# Altium footprint library BlackfinSOM.PcbLib: 28 footprints (part 1 of 2)
Each footprint in its own frame and in the unit in brackets; x right, y up, seen from the top. Pads: shape width x height; smd on the part's side, far side on the other; paste and mask are expansions set on the pad; w line width, h text height; cw(c..) or ccw(c..) is an arc to the next point about the centre after c.
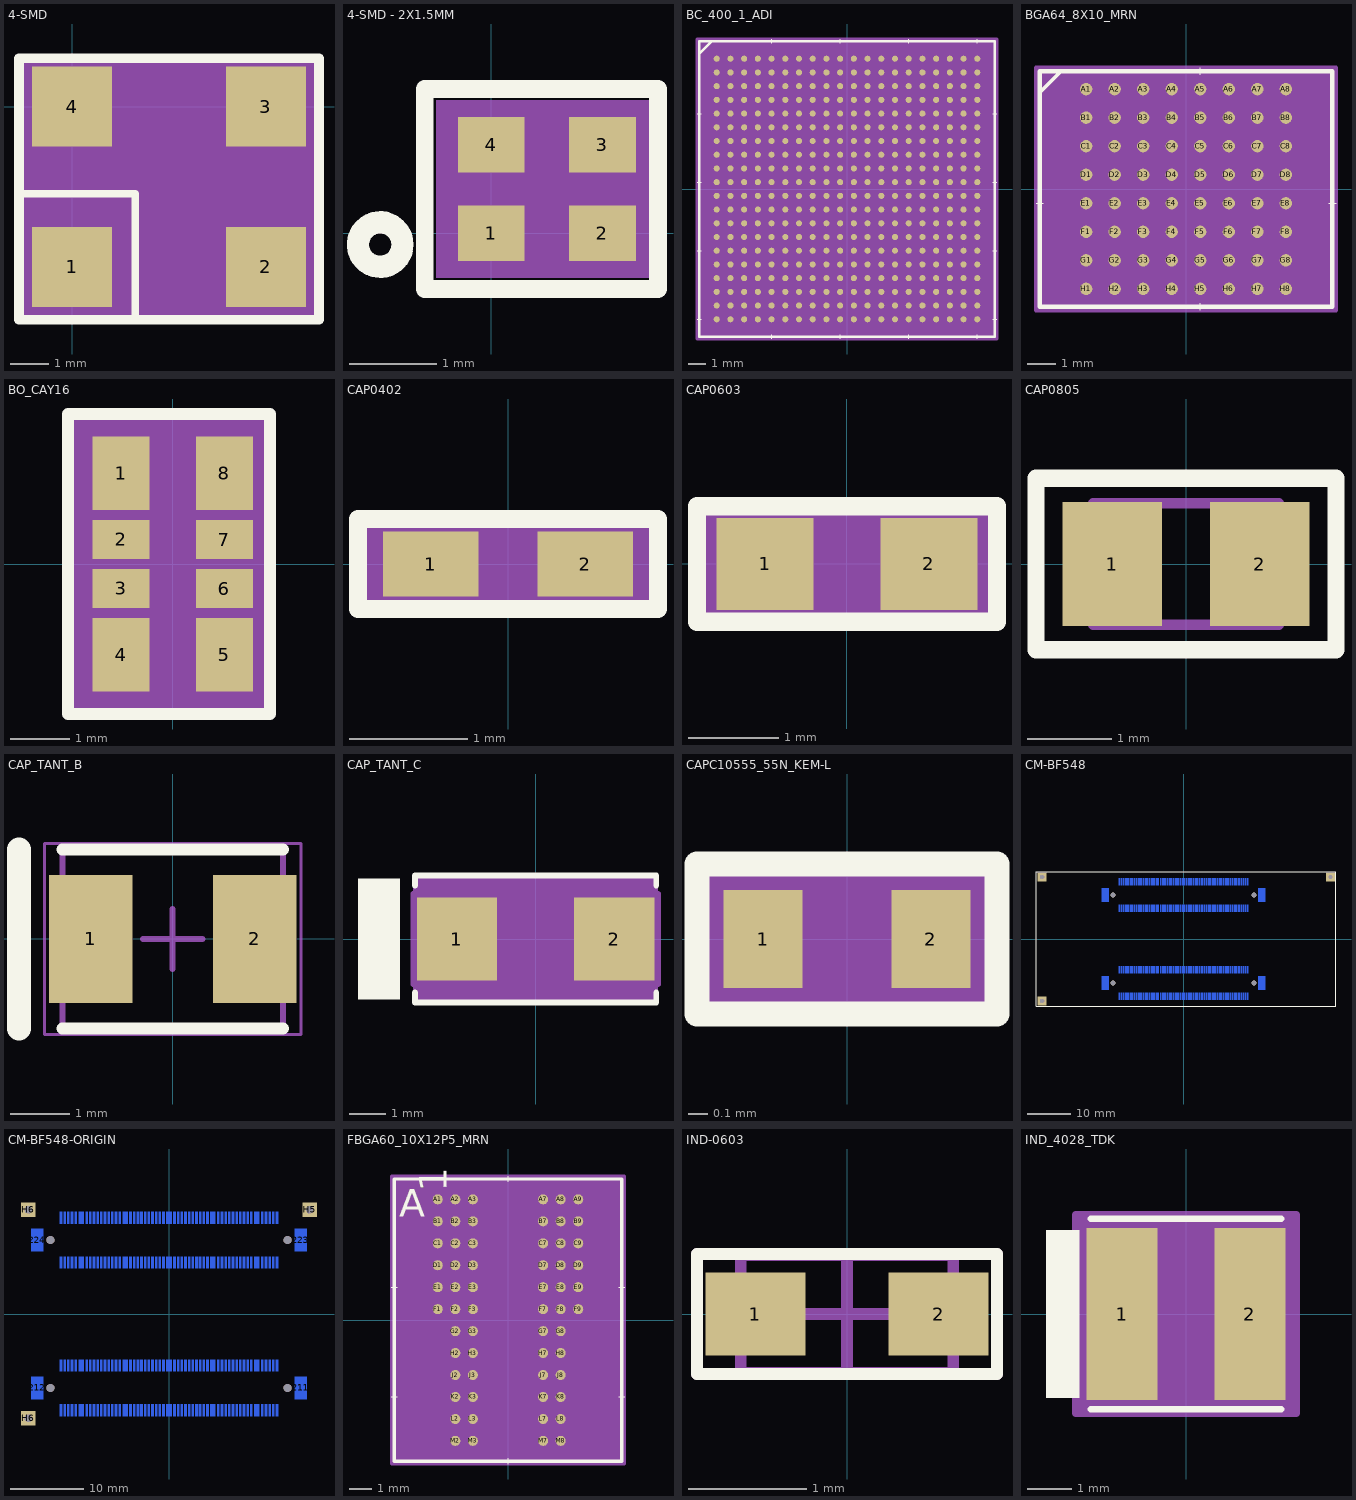
[diagram p0: the footprints below, top view; thin cyan lines are the x and y axes]

## 4-SMD [mm]
pads (4):
  rect 2.1x2.1 smd: 1(0,-4.2) 2(5.08,-4.2) 3(5.08,0) 4(0,0)
Top Overlay:
  lines w0.203: -1.397,-2.286 1.651,-2.286 1.651,-5.588
  lines w0.254: -1.397,-5.588 6.477,-5.588 6.477,1.27 -1.397,1.27 -1.397,-5.588
Mechanical 15:
  rectangle: -1.397,-5.588 6.477,1.27
3D body "User Library-CFPS72-73.STEP": height 1.51, standoff -0.01, extent -1.016,-4.445 5.984,0.555

## 4-SMD - 2X1.5MM [mil]
pads (4):
  rect 30x25 smd: 1(0,0) 2(50,0) 3(50,40) 4(0,40)
Top Overlay:
  circle w10: c-50,-5 r10
  lines w8: -30,-25 -30,65 75,65 75,-25 -30,-25
Mechanical 15:
  rectangle: -25,-20 75,60
3D body "crystal_rsx1612.stp": height 13.78, standoff -0.14, extent -6.49,-3.62 56.5,43.63

## BC_400_1_ADI [mm]
pads (400):
  round 0.356 smd paste+0 mask+0: A1(-7.6,7.6) A2(-6.8,7.6) A3(-6,7.6) A4(-5.2,7.6) A5(-4.4,7.6) A6(-3.6,7.6) A7(-2.8,7.6) A8(-2,7.6) A9(-1.2,7.6) A10(-0.4,7.6) A11(0.4,7.6) A12(1.2,7.6) A13(2,7.6) A14(2.8,7.6) A15(3.6,7.6) A16(4.4,7.6) A17(5.2,7.6) A18(6,7.6) A19(6.8,7.6) A20(7.6,7.6) B1(-7.6,6.8) B2(-6.8,6.8) B3(-6,6.8) B4(-5.2,6.8) B5(-4.4,6.8) B6(-3.6,6.8) B7(-2.8,6.8) B8(-2,6.8) B9(-1.2,6.8) B10(-0.4,6.8) B11(0.4,6.8) B12(1.2,6.8) B13(2,6.8) B14(2.8,6.8) B15(3.6,6.8) B16(4.4,6.8) B17(5.2,6.8) B18(6,6.8) B19(6.8,6.8) B20(7.6,6.8) C1(-7.6,6) C2(-6.8,6) C3(-6,6) C4(-5.2,6) C5(-4.4,6) C6(-3.6,6) C7(-2.8,6) C8(-2,6) C9(-1.2,6) C10(-0.4,6) C11(0.4,6) C12(1.2,6) C13(2,6) C14(2.8,6) C15(3.6,6) C16(4.4,6) C17(5.2,6) C18(6,6) C19(6.8,6) C20(7.6,6) D1(-7.6,5.2) D2(-6.8,5.2) D3(-6,5.2) D4(-5.2,5.2) D5(-4.4,5.2) D6(-3.6,5.2) D7(-2.8,5.2) D8(-2,5.2) D9(-1.2,5.2) D10(-0.4,5.2) D11(0.4,5.2) D12(1.2,5.2) D13(2,5.2) D14(2.8,5.2) D15(3.6,5.2) D16(4.4,5.2) D17(5.2,5.2) D18(6,5.2) D19(6.8,5.2) D20(7.6,5.2) E1(-7.6,4.4) E2(-6.8,4.4) E3(-6,4.4) E4(-5.2,4.4) E5(-4.4,4.4) E6(-3.6,4.4) E7(-2.8,4.4) E8(-2,4.4) E9(-1.2,4.4) E10(-0.4,4.4) E11(0.4,4.4) E12(1.2,4.4) E13(2,4.4) E14(2.8,4.4) E15(3.6,4.4) E16(4.4,4.4) E17(5.2,4.4) E18(6,4.4) E19(6.8,4.4) E20(7.6,4.4) F1(-7.6,3.6) F2(-6.8,3.6) F3(-6,3.6) F4(-5.2,3.6) F5(-4.4,3.6) F6(-3.6,3.6) F7(-2.8,3.6) F8(-2,3.6) F9(-1.2,3.6) F10(-0.4,3.6) F11(0.4,3.6) F12(1.2,3.6) F13(2,3.6) F14(2.8,3.6) F15(3.6,3.6) F16(4.4,3.6) F17(5.2,3.6) F18(6,3.6) F19(6.8,3.6) F20(7.6,3.6) G1(-7.6,2.8) G2(-6.8,2.8) G3(-6,2.8) G4(-5.2,2.8) G5(-4.4,2.8) G6(-3.6,2.8) G7(-2.8,2.8) G8(-2,2.8) G9(-1.2,2.8) G10(-0.4,2.8) G11(0.4,2.8) G12(1.2,2.8) G13(2,2.8) G14(2.8,2.8) G15(3.6,2.8) G16(4.4,2.8) G17(5.2,2.8) G18(6,2.8) G19(6.8,2.8) G20(7.6,2.8) H1(-7.6,2) H2(-6.8,2) H3(-6,2) H4(-5.2,2) H5(-4.4,2) H6(-3.6,2) H7(-2.8,2) H8(-2,2) H9(-1.2,2) H10(-0.4,2) H11(0.4,2) H12(1.2,2) H13(2,2) H14(2.8,2) H15(3.6,2) H16(4.4,2) H17(5.2,2) H18(6,2) H19(6.8,2) H20(7.6,2) J1(-7.6,1.2) J2(-6.8,1.2) J3(-6,1.2) J4(-5.2,1.2) J5(-4.4,1.2) J6(-3.6,1.2) J7(-2.8,1.2) J8(-2,1.2) J9(-1.2,1.2) J10(-0.4,1.2) J11(0.4,1.2) J12(1.2,1.2) J13(2,1.2) J14(2.8,1.2) J15(3.6,1.2) J16(4.4,1.2) J17(5.2,1.2) J18(6,1.2) J19(6.8,1.2) J20(7.6,1.2) K1(-7.6,0.4) K2(-6.8,0.4) K3(-6,0.4) K4(-5.2,0.4) K5(-4.4,0.4) K6(-3.6,0.4) K7(-2.8,0.4) K8(-2,0.4) K9(-1.2,0.4) K10(-0.4,0.4) K11(0.4,0.4) K12(1.2,0.4) K13(2,0.4) K14(2.8,0.4) K15(3.6,0.4) K16(4.4,0.4) K17(5.2,0.4) K18(6,0.4) K19(6.8,0.4) K20(7.6,0.4) L1(-7.6,-0.4) L2(-6.8,-0.4) L3(-6,-0.4) L4(-5.2,-0.4) L5(-4.4,-0.4) L6(-3.6,-0.4) L7(-2.8,-0.4) L8(-2,-0.4) L9(-1.2,-0.4) L10(-0.4,-0.4) L11(0.4,-0.4) L12(1.2,-0.4) L13(2,-0.4) L14(2.8,-0.4) L15(3.6,-0.4) L16(4.4,-0.4) L17(5.2,-0.4) L18(6,-0.4) L19(6.8,-0.4) L20(7.6,-0.4) M1(-7.6,-1.2) M2(-6.8,-1.2) M3(-6,-1.2) M4(-5.2,-1.2) M5(-4.4,-1.2) M6(-3.6,-1.2) M7(-2.8,-1.2) M8(-2,-1.2) M9(-1.2,-1.2) M10(-0.4,-1.2) M11(0.4,-1.2) M12(1.2,-1.2) M13(2,-1.2) M14(2.8,-1.2) M15(3.6,-1.2) M16(4.4,-1.2) M17(5.2,-1.2) M18(6,-1.2) M19(6.8,-1.2) M20(7.6,-1.2) N1(-7.6,-2) N2(-6.8,-2) N3(-6,-2) N4(-5.2,-2) N5(-4.4,-2) N6(-3.6,-2) N7(-2.8,-2) N8(-2,-2) N9(-1.2,-2) N10(-0.4,-2) N11(0.4,-2) N12(1.2,-2) N13(2,-2) N14(2.8,-2) N15(3.6,-2) N16(4.4,-2) N17(5.2,-2) N18(6,-2) N19(6.8,-2) N20(7.6,-2) P1(-7.6,-2.8) P2(-6.8,-2.8) P3(-6,-2.8) P4(-5.2,-2.8) P5(-4.4,-2.8) P6(-3.6,-2.8) P7(-2.8,-2.8) P8(-2,-2.8) P9(-1.2,-2.8) P10(-0.4,-2.8) P11(0.4,-2.8) P12(1.2,-2.8) P13(2,-2.8) P14(2.8,-2.8) P15(3.6,-2.8) P16(4.4,-2.8) P17(5.2,-2.8) P18(6,-2.8) P19(6.8,-2.8) P20(7.6,-2.8) R1(-7.6,-3.6) R2(-6.8,-3.6) R3(-6,-3.6) R4(-5.2,-3.6) R5(-4.4,-3.6) R6(-3.6,-3.6) R7(-2.8,-3.6) R8(-2,-3.6) R9(-1.2,-3.6) R10(-0.4,-3.6) R11(0.4,-3.6) R12(1.2,-3.6) R13(2,-3.6) R14(2.8,-3.6) R15(3.6,-3.6) R16(4.4,-3.6) R17(5.2,-3.6) R18(6,-3.6) R19(6.8,-3.6) R20(7.6,-3.6) T1(-7.6,-4.4) T2(-6.8,-4.4) T3(-6,-4.4) T4(-5.2,-4.4) T5(-4.4,-4.4) T6(-3.6,-4.4) T7(-2.8,-4.4) T8(-2,-4.4) T9(-1.2,-4.4) T10(-0.4,-4.4) T11(0.4,-4.4) T12(1.2,-4.4) T13(2,-4.4) T14(2.8,-4.4) T15(3.6,-4.4) T16(4.4,-4.4) T17(5.2,-4.4) T18(6,-4.4) T19(6.8,-4.4) T20(7.6,-4.4) U1(-7.6,-5.2) U2(-6.8,-5.2) U3(-6,-5.2) U4(-5.2,-5.2) U5(-4.4,-5.2) U6(-3.6,-5.2) U7(-2.8,-5.2) U8(-2,-5.2) U9(-1.2,-5.2) U10(-0.4,-5.2) U11(0.4,-5.2) U12(1.2,-5.2) U13(2,-5.2) U14(2.8,-5.2) U15(3.6,-5.2) U16(4.4,-5.2) U17(5.2,-5.2) U18(6,-5.2) U19(6.8,-5.2) U20(7.6,-5.2) V1(-7.6,-6) V2(-6.8,-6) V3(-6,-6) V4(-5.2,-6) V5(-4.4,-6) V6(-3.6,-6) V7(-2.8,-6) V8(-2,-6) V9(-1.2,-6) V10(-0.4,-6) V11(0.4,-6) V12(1.2,-6) V13(2,-6) V14(2.8,-6) V15(3.6,-6) V16(4.4,-6) V17(5.2,-6) V18(6,-6) V19(6.8,-6) V20(7.6,-6) W1(-7.6,-6.8) W2(-6.8,-6.8) W3(-6,-6.8) W4(-5.2,-6.8) W5(-4.4,-6.8) W6(-3.6,-6.8) W7(-2.8,-6.8) W8(-2,-6.8) W9(-1.2,-6.8) W10(-0.4,-6.8) W11(0.4,-6.8) W12(1.2,-6.8) W13(2,-6.8) W14(2.8,-6.8) W15(3.6,-6.8) W16(4.4,-6.8) W17(5.2,-6.8) W18(6,-6.8) W19(6.8,-6.8) W20(7.6,-6.8) Y1(-7.6,-7.6) Y2(-6.8,-7.6) Y3(-6,-7.6) Y4(-5.2,-7.6) Y5(-4.4,-7.6) Y6(-3.6,-7.6) Y7(-2.8,-7.6) Y8(-2,-7.6) Y9(-1.2,-7.6) Y10(-0.4,-7.6) Y11(0.4,-7.6) Y12(1.2,-7.6) Y13(2,-7.6) Y14(2.8,-7.6) Y15(3.6,-7.6) Y16(4.4,-7.6) Y17(5.2,-7.6) Y18(6,-7.6) Y19(6.8,-7.6) Y20(7.6,-7.6)
Top Overlay:
  lines w0.025: -8.75,-7.6 -8.496,-7.6 ; -8.75,-3.6 -8.496,-3.6 ; -8.75,0.4 -8.496,0.4 ; -8.75,4.4 -8.496,4.4 ; -4.4,-8.75 -4.4,-8.496 ; -4.4,8.496 -4.4,8.75 ; -0.4,-8.75 -0.4,-8.496 ; -0.4,8.496 -0.4,8.75 ; 3.6,-8.75 3.6,-8.496 ; 3.6,8.496 3.6,8.75 ; 7.6,-8.75 7.6,-8.496 ; 7.6,8.496 7.6,8.75 ; 8.496,-7.6 8.75,-7.6 ; 8.496,-3.6 8.75,-3.6 ; 8.496,0.4 8.75,0.4 ; 8.496,4.4 8.75,4.4
  lines w0.127: -8.636,7.874 -7.874,8.636
  lines w0.152: -8.623,-8.623 -8.623,8.623 8.623,8.623 8.623,-8.623 -8.623,-8.623
Mechanical 13:
  lines w0.025: -8.496,8.096 -8.096,8.496 ; -8.496,-8.496 -8.496,8.496 8.496,8.496 8.496,-8.496 -8.496,-8.496
Mechanical 15:
  region: 8.75,-8.75 -8.75,-8.75 -8.75,8.75 8.75,8.75
  lines w0.152: -8.75,-8.75 8.75,-8.75 8.75,8.75 -8.75,8.75 -8.75,-8.75
3D body: height 0.25, standoff 0, extent 0,0 0.254,0.254
3D body "BC_400_1_ADI.step": height 1.7, standoff 0, extent -8.496,-8.496 8.496,8.496

## BGA64_8X10_MRN [mm]
pads (64):
  round 0.432 smd paste+0 mask+0: A1(-3.5,3.5) A2(-2.5,3.5) A3(-1.5,3.5) A4(-0.5,3.5) A5(0.5,3.5) A6(1.5,3.5) A7(2.5,3.5) A8(3.5,3.5) B1(-3.5,2.5) B2(-2.5,2.5) B3(-1.5,2.5) B4(-0.5,2.5) B5(0.5,2.5) B6(1.5,2.5) B7(2.5,2.5) B8(3.5,2.5) C1(-3.5,1.5) C2(-2.5,1.5) C3(-1.5,1.5) C4(-0.5,1.5) C5(0.5,1.5) C6(1.5,1.5) C7(2.5,1.5) C8(3.5,1.5) D1(-3.5,0.5) D2(-2.5,0.5) D3(-1.5,0.5) D4(-0.5,0.5) D5(0.5,0.5) D6(1.5,0.5) D7(2.5,0.5) D8(3.5,0.5) E1(-3.5,-0.5) E2(-2.5,-0.5) E3(-1.5,-0.5) E4(-0.5,-0.5) E5(0.5,-0.5) E6(1.5,-0.5) E7(2.5,-0.5) E8(3.5,-0.5) F1(-3.5,-1.5) F2(-2.5,-1.5) F3(-1.5,-1.5) F4(-0.5,-1.5) F5(0.5,-1.5) F6(1.5,-1.5) F7(2.5,-1.5) F8(3.5,-1.5) G1(-3.5,-2.5) G2(-2.5,-2.5) G3(-1.5,-2.5) G4(-0.5,-2.5) G5(0.5,-2.5) G6(1.5,-2.5) G7(2.5,-2.5) G8(3.5,-2.5) H1(-3.5,-3.5) H2(-2.5,-3.5) H3(-1.5,-3.5) H4(-0.5,-3.5) H5(0.5,-3.5) H6(1.5,-3.5) H7(2.5,-3.5) H8(3.5,-3.5)
Top Overlay:
  lines w0.025: -5.258,-0.5 -5.004,-0.5 ; 0.5,-4.255 0.5,-4 ; 0.5,4 0.5,4.255 ; 5.004,-0.5 5.258,-0.5
  lines w0.127: -5.08,3.429 -4.445,4.064
  lines w0.152: -5.131,-4.127 5.131,-4.127 5.131,4.127 -5.131,4.127 -5.131,-4.127
Mechanical 13:
  lines w0.025: -5.004,3.501 -4.504,4 ; -5.004,-4 5.004,-4 5.004,4 -5.004,4 -5.004,-4
Mechanical 15:
  region: 5.258,-4.255 -5.258,-4.255 -5.258,4.255 5.258,4.255
  lines w0.152: -5.258,-4.255 -5.258,4.255 5.258,4.255 5.258,-4.255 -5.258,-4.255
3D body: height 0.25, standoff 0, extent 0,0 0.254,0.254
3D body "BGA64_8X10_MRN.step": height 1.2, standoff 0, extent -5.004,-4 5.004,4

## BO_CAY16 [mil]
pads (8):
  rect 38x49 smd: 1(-34.5,60.5) 4(-34.5,-60.5) 5(34.5,-60.5) 8(34.5,60.5)
  rect 38x26 smd mask+0: 2(-34.5,16.35) 3(-34.5,-16.3) 6(34.5,-16.35) 7(34.5,16.3)
Top Overlay:
  lines w8: -70,-100 65,-100 65,100 -70,100 -70,-100
Mechanical 13:
  lines w0: -35.5,-35.95 ccw(c-35.5,-32.62) -35.5,-29.3 ; -35.5,-3.3 ccw(c-35.5,0.03) -35.5,3.35 ; -35.5,29.35 ccw(c-35.5,32.67) -35.5,36 ; 35.5,-35.95 cw(c35.5,-32.62) 35.5,-29.3 ; 35.5,-3.3 cw(c35.5,0.03) 35.5,3.35 ; 35.5,29.35 cw(c35.5,32.67) 35.5,36
  lines w1: -35.5,-36 -35.5,-67 35.5,-67 35.5,-36 ; -35.5,-29.3 -35.5,-3.3 ; -35.5,3.35 -35.5,29.35 ; -35.5,36 -35.5,67 35.5,67 35.5,36 ; -35.5,57 -25.5,67 ; 35.5,-29.3 35.5,-3.3 ; 35.5,3.35 35.5,29.35
  text "*" at -33,22 h50
Mechanical 15:
  region: 63.5,-95 -63.5,-95 -63.5,95 63.5,95
  region: 35.5,-67 -35.5,-67 -35.5,67 35.5,67
  lines w6: -63.5,-95 -63.5,95 63.5,95 63.5,-95 -63.5,-95
3D body: height 10, standoff 0, extent 0,0 10,10
3D body "BO_CAY16.step": height 24.02, standoff 0, extent -35.51,-67 35.51,67.01

## CAP0402 [mm]
pads (2):
  rect 0.809x0.551 smd paste+0 mask+0: 1(-0.654,0) 2(0.654,0)
Top Overlay:
  lines w0.152: -1.27,-0.381 1.27,-0.381 1.27,0.381 -1.27,0.381 -1.27,-0.381
Mechanical 13:
  circle w0: c-0.527,0 r0.076
  lines w0.025: -0.5,-0.25 -0.5,0.25 ; -0.5,-0.25 -0.25,-0.25 -0.25,0.25 -0.5,0.25 ; -0.5,-0.25 0.5,-0.25 ; -0.5,-0.25 -0.5,0.25 ; -0.5,0.25 0.5,0.25 ; 0.5,-0.25 0.25,-0.25 0.25,0.25 0.5,0.25 ; 0.5,-0.25 0.5,0.25 ; 0.5,-0.25 0.5,0.25
Mechanical 15:
  region: 1.143,-0.254 -1.143,-0.254 -1.143,0.254 1.143,0.254
  lines w0.152: -1.143,-0.254 -1.143,0.254 1.143,0.254 1.143,-0.254 -1.143,-0.254
3D body: height 0.25, standoff 0, extent 0,0 0.254,0.254
3D body "CAPC1005X56N EIA 0402.step": height 0.56, standoff 0, extent -0.5,-0.25 0.5,0.25

## CAP0603 [mil]
pads (2):
  rect 42x40 smd paste+0 mask+0: 1(-35.5,0) 2(35.5,0)
Top Overlay:
  lines w8: -65,-25 -65,25 65,25 65,-25 -65,-25
Mechanical 13:
  circle w0: c-24.5,0 r3
  lines w1: -34.5,-19 -34.5,19 ; -34.5,-19 -14.5,-19 -14.5,19 -34.5,19 ; -34.5,-19 34.5,-19 ; -34.5,-19 -34.5,19 ; -34.5,19 34.5,19 ; 34.5,-19 14.5,-19 14.5,19 34.5,19 ; 34.5,-19 34.5,19 ; 34.5,-19 34.5,19
Mechanical 15:
  region: 60,-20 -60,-20 -60,20 60,20
  lines w6: -60,-20 -60,20 60,20 60,-20 -60,-20
3D body: height 10, standoff 0, extent 0,0 10,10
3D body "CAP_0603G_AVX-M.step": height 35, standoff 0, extent -34.49,-19.01 34.49,19.02

## CAP0805 [mm]
pads (2):
  rect 1.18x1.47 smd: 1(-0.874,0) 2(0.874,0)
Top Overlay:
  lines w0.203: -1.778,-1.016 1.778,-1.016 1.778,1.016 -1.778,1.016 -1.778,-1.016
Mechanical 13:
  lines w0.127: -1.1,-0.72 -1.1,0.72 1.1,0.72 1.1,-0.72 -1.1,-0.72
Mechanical 15:
  lines w0.05: -1.713,-0.983 -1.713,0.983 1.713,0.983 1.713,-0.983 -1.713,-0.983
3D body "c0805c221k5ractu.stp": height 0.86, standoff -0.02, extent -1.1,-0.688 1.1,0.762

## CAP_TANT_B [mm] "Molded Capacitor, 2-Leads, Body 3.70x3.00mm, IPC High Density"
height 2.1
pads (2):
  rect 1.4x2.15 smd: 1(-1.375,0) 2(1.375,0)
Top Overlay:
  lines w0.2: -1.85,-1.5 1.85,-1.5 ; -1.85,1.5 1.85,1.5
  lines w0.4: -2.575,-1.5 -2.575,1.5
Mechanical 13:
  lines w0.1: -1.85,-1.5 1.85,-1.5 1.85,1.5 -1.85,1.5 -1.85,-1.5
Mechanical 15:
  lines w0.05: -2.15,-1.6 2.15,-1.6 2.15,1.6 -2.15,1.6 -2.15,-1.6
  lines w0.1: -0.5,0 0.5,0 ; 0,-0.5 0,0.5
3D body "CAPMP3528X21L.step": height 2.1, standoff 0, extent -2.07,-1.5 2.07,1.5

## CAP_TANT_C [mm]
pads (2):
  rect 2.179x2.249 smd paste+0 mask+0: 1(-2.136,0) 2(2.136,0)
Top Overlay:
  rectangle: -4.826,-1.651 -3.683,1.651
  lines w0.152: -3.277,-1.453 -3.277,-1.727 3.277,-1.727 3.277,-1.453 ; -3.277,1.453 -3.277,1.727 3.277,1.727 3.277,1.453
Mechanical 13:
  lines w0.025: -3.15,-1.6 3.15,-1.6 3.15,1.6 -3.15,1.6 -3.15,-1.6
Mechanical 15:
  region: -3.252,-1.226 -3.328,-1.226 -3.328,1.226 -3.252,1.226 -3.252,1.702 3.252,1.702 3.252,1.226 3.328,1.226 3.328,-1.226 3.252,-1.226 3.252,-1.702 -3.252,-1.702
  lines w0.152: -3.328,-1.226 -3.328,1.226 -3.252,1.226 -3.252,1.702 3.252,1.702 3.252,1.226 3.328,1.226 3.328,-1.226 3.252,-1.226 3.252,-1.702 -3.252,-1.702 -3.252,-1.226 -3.328,-1.226
3D body: height 0.25, standoff 0, extent 0,0 0.254,0.254
3D body "User Library-AVX_C_CASE.STEP": height 2.7, standoff 0, extent -3.05,-1.623 3.05,1.727

## CAPC10555_55N_KEM-L [mm]
pads (2):
  rect 0.402x0.499 smd paste+0 mask+0: 1(-0.426,0) 2(0.426,0)
Top Overlay:
  lines w0.127: -0.762,-0.381 0.762,-0.381 0.762,0.381 -0.762,0.381 -0.762,-0.381
Mechanical 5:
  region: 0.762,-0.381 -0.762,-0.381 -0.762,0.381 0.762,0.381
Mechanical 13:
  lines w0.025: -0.525,-0.275 -0.525,0.275 ; -0.525,-0.275 -0.275,-0.275 -0.275,0.275 -0.525,0.275 ; -0.525,-0.275 0.525,-0.275 ; -0.525,-0.275 -0.525,0.275 ; -0.525,0.275 0.525,0.275 ; 0.525,-0.275 0.275,-0.275 0.275,0.275 0.525,0.275 ; 0.525,-0.275 0.525,0.275 ; 0.525,-0.275 0.525,0.275
Mechanical 15:
  region: 0.728,-0.351 -0.728,-0.351 -0.728,0.351 0.728,0.351
  lines w0.152: -0.728,-0.351 -0.728,0.351 0.728,0.351 0.728,-0.351 -0.728,-0.351
3D body "User Library-0402(1005M) Cap.STEP": height 0.51, standoff 0, extent -0.508,-0.254 0.508,0.254
3D body: height 0.25, standoff 0, extent 0,0 0.254,0.254

## CM-BF548 [mm]
height 7
pads (231):
  rect 0.3x1.6 smd far side paste-0.03: 1(14.75,-13.15) 2(14.25,-13.15) 3(13.75,-13.15) 4(13.25,-13.15) 5(12.75,-13.15) 6(11.25,-13.15) 7(10.75,-13.15) 8(10.25,-13.15) 9(9.75,-13.15) 10(9.25,-13.15) 11(8.75,-13.15) 12(8.25,-13.15) 13(7.75,-13.15) 14(7.25,-13.15) 15(6.75,-13.15) 16(5.25,-13.15) 17(4.75,-13.15) 18(4.25,-13.15) 19(3.75,-13.15) 20(3.25,-13.15) 21(2.75,-13.15) 22(2.25,-13.15) 23(1.75,-13.15) 24(1.25,-13.15) 25(0.75,-13.15) 26(-0.75,-13.15) 27(-1.25,-13.15) 28(-1.75,-13.15) 29(-2.25,-13.15) 30(-2.75,-13.15) 31(-3.25,-13.15) 32(-3.75,-13.15) 33(-4.25,-13.15) 34(-4.75,-13.15) 35(-5.25,-13.15) 36(-6.75,-13.15) 37(-7.25,-13.15) 38(-7.75,-13.15) 39(-8.25,-13.15) 40(-8.75,-13.15) 41(-9.25,-13.15) 42(-9.75,-13.15) 43(-10.25,-13.15) 44(-10.75,-13.15) 45(-11.25,-13.15) 46(-12.75,-13.15) 47(-13.25,-13.15) 48(-13.75,-13.15) 49(-14.25,-13.15) 50(-14.75,-13.15) 51(-14.75,-7.05) 52(-14.25,-7.05) 53(-13.75,-7.05) 54(-13.25,-7.05) 55(-12.75,-7.05) 56(-11.25,-7.05) 57(-10.75,-7.05) 58(-10.25,-7.05) 59(-9.75,-7.05) 60(-9.25,-7.05) 61(-8.75,-7.05) 62(-8.25,-7.05) 63(-7.75,-7.05) 64(-7.25,-7.05) 65(-6.75,-7.05) 66(-5.25,-7.05) 67(-4.75,-7.05) 68(-4.25,-7.05) 69(-3.75,-7.05) 70(-3.25,-7.05) 71(-2.75,-7.05) 72(-2.25,-7.05) 73(-1.75,-7.05) 74(-1.25,-7.05) 75(-0.75,-7.05) 76(0.75,-7.05) 77(1.25,-7.05) 78(1.75,-7.05) 79(2.25,-7.05) 80(2.75,-7.05) 81(3.25,-7.05) 82(3.75,-7.05) 83(4.25,-7.05) 84(4.75,-7.05) 85(5.25,-7.05) 86(6.75,-7.05) 87(7.25,-7.05) 88(7.75,-7.05) 89(8.25,-7.05) 90(8.75,-7.05) 91(9.25,-7.05) 92(9.75,-7.05) 93(10.25,-7.05) 94(10.75,-7.05) 95(11.25,-7.05) 96(12.75,-7.05) 97(13.25,-7.05) 98(13.75,-7.05) 99(14.25,-7.05) 100(14.75,-7.05) 101(14.75,7.05) 102(14.25,7.05) 103(13.75,7.05) 104(13.25,7.05) 105(12.75,7.05) 106(11.25,7.05) 107(10.75,7.05) 108(10.25,7.05) 109(9.75,7.05) 110(9.25,7.05) 111(8.75,7.05) 112(8.25,7.05) 113(7.75,7.05) 114(7.25,7.05) 115(6.75,7.05) 116(5.25,7.05) 117(4.75,7.05) 118(4.25,7.05) 119(3.75,7.05) 120(3.25,7.05) 121(2.75,7.05) 122(2.25,7.05) 123(1.75,7.05) 124(1.25,7.05) 125(0.75,7.05) 126(-0.75,7.05) 127(-1.25,7.05) 128(-1.75,7.05) 129(-2.25,7.05) 130(-2.75,7.05) 131(-3.25,7.05) 132(-3.75,7.05) 133(-4.25,7.05) 134(-4.75,7.05) 135(-5.25,7.05) 136(-6.75,7.05) 137(-7.25,7.05) 138(-7.75,7.05) 139(-8.25,7.05) 140(-8.75,7.05) 141(-9.25,7.05) 142(-9.75,7.05) 143(-10.25,7.05) 144(-10.75,7.05) 145(-11.25,7.05) 146(-12.75,7.05) 147(-13.25,7.05) 148(-13.75,7.05) 149(-14.25,7.05) 150(-14.75,7.05) 151(-14.75,13.15) 152(-14.25,13.15) 153(-13.75,13.15) 154(-13.25,13.15) 155(-12.75,13.15) 156(-11.25,13.15) 157(-10.75,13.15) 158(-10.25,13.15) 159(-9.75,13.15) 160(-9.25,13.15) 161(-8.75,13.15) 162(-8.25,13.15) 163(-7.75,13.15) 164(-7.25,13.15) 165(-6.75,13.15) 166(-5.25,13.15) 167(-4.75,13.15) 168(-4.25,13.15) 169(-3.75,13.15) 170(-3.25,13.15) 171(-2.75,13.15) 172(-2.25,13.15) 173(-1.75,13.15) 174(-1.25,13.15) 175(-0.75,13.15) 176(0.75,13.15) 177(1.25,13.15) 178(1.75,13.15) 179(2.25,13.15) 180(2.75,13.15) 181(3.25,13.15) 182(3.75,13.15) 183(4.25,13.15) 184(4.75,13.15) 185(5.25,13.15) 186(6.75,13.15) 187(7.25,13.15) 188(7.75,13.15) 189(8.25,13.15) 190(8.75,13.15) 191(9.25,13.15) 192(9.75,13.15) 193(10.25,13.15) 194(10.75,13.15) 195(11.25,13.15) 196(12.75,13.15) 197(13.25,13.15) 198(13.75,13.15) 199(14.25,13.15) 200(14.75,13.15)
  rect 0.7x1.6 smd far side paste-0.03: 201(12,-13.15) 202(6,-13.15) 203(0,-13.15) 204(-6,-13.15) 205(-12,-13.15) 206(-12,-7.05) 207(-6,-7.05) 208(0,-7.05) 209(6,-7.05) 210(12,-7.05) 213(12,7.05) 214(6,7.05) 215(0,7.05) 216(-6,7.05) 217(-12,7.05) 218(12,13.15) 219(6,13.15) 220(0,13.15) 221(-6,13.15) 222(-12,13.15)
  rect 1.6x3.1 smd far side: 211(18,-10.1) 212(-18,-10.1) 223(18,10.1) 224(-18,10.1)
  round 1.1 hole 1.1 unplated: h1(16.2,-10.1) h2(-16.2,-10.1) h3(16.2,10.1) h4(-16.2,10.1)
  rect 2x2 hole 1: H5(33.782,14.25) H6(-32.512,-14.25) H6(-32.512,14.25)
Top Overlay:
  lines w0.2: -33.909,-15.5 35.052,-15.5 35.052,15.5 -33.909,15.5 -33.909,-15.5
Bottom Overlay:
  lines w0.254: -18.034,-11.938 -18.034,-14.224 15.851,-14.224 18.022,-12.053 ; -18.034,-8.255 -18.034,-5.969 17.78,-5.969 17.78,-8.255 ; -17.907,8.255 -17.907,5.842 15.717,5.842 17.828,7.953 ; -17.907,11.938 -17.907,14.351 17.78,14.351 17.78,12.065
3D body "FX10A-100P10-SV.stp": height 3.51, standoff -0.59, extent -18.558,-13.11 18.542,-7.21
3D body "FX10A-100P10-SV.stp": height 3.51, standoff -0.59, extent -18.475,7.172 18.625,13.072

## CM-BF548-ORIGIN [mm]
height 7
pads (231):
  rect 0.3x1.6 smd far side paste-0.03: 1(14.75,-13.15) 2(14.25,-13.15) 3(13.75,-13.15) 4(13.25,-13.15) 5(12.75,-13.15) 6(11.25,-13.15) 7(10.75,-13.15) 8(10.25,-13.15) 9(9.75,-13.15) 10(9.25,-13.15) 11(8.75,-13.15) 12(8.25,-13.15) 13(7.75,-13.15) 14(7.25,-13.15) 15(6.75,-13.15) 16(5.25,-13.15) 17(4.75,-13.15) 18(4.25,-13.15) 19(3.75,-13.15) 20(3.25,-13.15) 21(2.75,-13.15) 22(2.25,-13.15) 23(1.75,-13.15) 24(1.25,-13.15) 25(0.75,-13.15) 26(-0.75,-13.15) 27(-1.25,-13.15) 28(-1.75,-13.15) 29(-2.25,-13.15) 30(-2.75,-13.15) 31(-3.25,-13.15) 32(-3.75,-13.15) 33(-4.25,-13.15) 34(-4.75,-13.15) 35(-5.25,-13.15) 36(-6.75,-13.15) 37(-7.25,-13.15) 38(-7.75,-13.15) 39(-8.25,-13.15) 40(-8.75,-13.15) 41(-9.25,-13.15) 42(-9.75,-13.15) 43(-10.25,-13.15) 44(-10.75,-13.15) 45(-11.25,-13.15) 46(-12.75,-13.15) 47(-13.25,-13.15) 48(-13.75,-13.15) 49(-14.25,-13.15) 50(-14.75,-13.15) 51(-14.75,-7.05) 52(-14.25,-7.05) 53(-13.75,-7.05) 54(-13.25,-7.05) 55(-12.75,-7.05) 56(-11.25,-7.05) 57(-10.75,-7.05) 58(-10.25,-7.05) 59(-9.75,-7.05) 60(-9.25,-7.05) 61(-8.75,-7.05) 62(-8.25,-7.05) 63(-7.75,-7.05) 64(-7.25,-7.05) 65(-6.75,-7.05) 66(-5.25,-7.05) 67(-4.75,-7.05) 68(-4.25,-7.05) 69(-3.75,-7.05) 70(-3.25,-7.05) 71(-2.75,-7.05) 72(-2.25,-7.05) 73(-1.75,-7.05) 74(-1.25,-7.05) 75(-0.75,-7.05) 76(0.75,-7.05) 77(1.25,-7.05) 78(1.75,-7.05) 79(2.25,-7.05) 80(2.75,-7.05) 81(3.25,-7.05) 82(3.75,-7.05) 83(4.25,-7.05) 84(4.75,-7.05) 85(5.25,-7.05) 86(6.75,-7.05) 87(7.25,-7.05) 88(7.75,-7.05) 89(8.25,-7.05) 90(8.75,-7.05) 91(9.25,-7.05) 92(9.75,-7.05) 93(10.25,-7.05) 94(10.75,-7.05) 95(11.25,-7.05) 96(12.75,-7.05) 97(13.25,-7.05) 98(13.75,-7.05) 99(14.25,-7.05) 100(14.75,-7.05) 101(14.75,7.05) 102(14.25,7.05) 103(13.75,7.05) 104(13.25,7.05) 105(12.75,7.05) 106(11.25,7.05) 107(10.75,7.05) 108(10.25,7.05) 109(9.75,7.05) 110(9.25,7.05) 111(8.75,7.05) 112(8.25,7.05) 113(7.75,7.05) 114(7.25,7.05) 115(6.75,7.05) 116(5.25,7.05) 117(4.75,7.05) 118(4.25,7.05) 119(3.75,7.05) 120(3.25,7.05) 121(2.75,7.05) 122(2.25,7.05) 123(1.75,7.05) 124(1.25,7.05) 125(0.75,7.05) 126(-0.75,7.05) 127(-1.25,7.05) 128(-1.75,7.05) 129(-2.25,7.05) 130(-2.75,7.05) 131(-3.25,7.05) 132(-3.75,7.05) 133(-4.25,7.05) 134(-4.75,7.05) 135(-5.25,7.05) 136(-6.75,7.05) 137(-7.25,7.05) 138(-7.75,7.05) 139(-8.25,7.05) 140(-8.75,7.05) 141(-9.25,7.05) 142(-9.75,7.05) 143(-10.25,7.05) 144(-10.75,7.05) 145(-11.25,7.05) 146(-12.75,7.05) 147(-13.25,7.05) 148(-13.75,7.05) 149(-14.25,7.05) 150(-14.75,7.05) 151(-14.75,13.15) 152(-14.25,13.15) 153(-13.75,13.15) 154(-13.25,13.15) 155(-12.75,13.15) 156(-11.25,13.15) 157(-10.75,13.15) 158(-10.25,13.15) 159(-9.75,13.15) 160(-9.25,13.15) 161(-8.75,13.15) 162(-8.25,13.15) 163(-7.75,13.15) 164(-7.25,13.15) 165(-6.75,13.15) 166(-5.25,13.15) 167(-4.75,13.15) 168(-4.25,13.15) 169(-3.75,13.15) 170(-3.25,13.15) 171(-2.75,13.15) 172(-2.25,13.15) 173(-1.75,13.15) 174(-1.25,13.15) 175(-0.75,13.15) 176(0.75,13.15) 177(1.25,13.15) 178(1.75,13.15) 179(2.25,13.15) 180(2.75,13.15) 181(3.25,13.15) 182(3.75,13.15) 183(4.25,13.15) 184(4.75,13.15) 185(5.25,13.15) 186(6.75,13.15) 187(7.25,13.15) 188(7.75,13.15) 189(8.25,13.15) 190(8.75,13.15) 191(9.25,13.15) 192(9.75,13.15) 193(10.25,13.15) 194(10.75,13.15) 195(11.25,13.15) 196(12.75,13.15) 197(13.25,13.15) 198(13.75,13.15) 199(14.25,13.15) 200(14.75,13.15)
  rect 0.7x1.6 smd far side paste-0.03: 201(12,-13.15) 202(6,-13.15) 203(0,-13.15) 204(-6,-13.15) 205(-12,-13.15) 206(-12,-7.05) 207(-6,-7.05) 208(0,-7.05) 209(6,-7.05) 210(12,-7.05) 213(12,7.05) 214(6,7.05) 215(0,7.05) 216(-6,7.05) 217(-12,7.05) 218(12,13.15) 219(6,13.15) 220(0,13.15) 221(-6,13.15) 222(-12,13.15)
  rect 1.6x3.1 smd far side: 211(18,-10.1) 212(-18,-10.1) 223(18,10.1) 224(-18,10.1)
  round 1.1 hole 1.1 unplated: h1(16.2,-10.1) h2(-16.2,-10.1) h3(16.2,10.1) h4(-16.2,10.1)
  rect 2x2 hole 1: H5(19.25,14.25) H6(-19.25,-14.25) H6(-19.25,14.25)
Bottom Overlay:
  lines w0.2: -20.5,-15.5 -20.5,15.5 20.5,15.5 20.5,-15.5 -20.5,-15.5
  lines w0.254: -18.575,-13.75 -18.575,-6.45 18.525,-6.45 18.525,-11.55 16.325,-13.75 -18.575,-13.75 ; -18.575,6.45 -18.575,13.75 18.525,13.75 18.525,8.65 16.325,6.45 -18.575,6.45

## FBGA60_10X12P5_MRN [mm]
pads (60):
  round 0.457 smd paste+0 mask+0: A1(-3.2,5.5) A2(-2.4,5.5) A3(-1.6,5.5) A7(1.6,5.5) A8(2.4,5.5) A9(3.2,5.5) B1(-3.2,4.5) B2(-2.4,4.5) B3(-1.6,4.5) B7(1.6,4.5) B8(2.4,4.5) B9(3.2,4.5) C1(-3.2,3.5) C2(-2.4,3.5) C3(-1.6,3.5) C7(1.6,3.5) C8(2.4,3.5) C9(3.2,3.5) D1(-3.2,2.5) D2(-2.4,2.5) D3(-1.6,2.5) D7(1.6,2.5) D8(2.4,2.5) D9(3.2,2.5) E1(-3.2,1.5) E2(-2.4,1.5) E3(-1.6,1.5) E7(1.6,1.5) E8(2.4,1.5) E9(3.2,1.5) F1(-3.2,0.5) F2(-2.4,0.5) F3(-1.6,0.5) F7(1.6,0.5) F8(2.4,0.5) F9(3.2,0.5) G2(-2.4,-0.5) G3(-1.6,-0.5) G7(1.6,-0.5) G8(2.4,-0.5) H2(-2.4,-1.5) H3(-1.6,-1.5) H7(1.6,-1.5) H8(2.4,-1.5) J2(-2.4,-2.5) J3(-1.6,-2.5) J7(1.6,-2.5) J8(2.4,-2.5) K2(-2.4,-3.5) K3(-1.6,-3.5) K7(1.6,-3.5) K8(2.4,-3.5) L2(-2.4,-4.5) L3(-1.6,-4.5) L7(1.6,-4.5) L8(2.4,-4.5) M2(-2.4,-5.5) M3(-1.6,-5.5) M7(1.6,-5.5) M8(2.4,-5.5)
Top Overlay:
  lines w0.025: -5.309,-3.5 -5.055,-3.5 ; -5.309,1.5 -5.055,1.5 ; 0,-6.553 0,-6.299 ; 0,6.299 0,6.553 ; 5.055,-3.5 5.309,-3.5 ; 5.055,1.5 5.309,1.5
  lines w0.152: -5.182,-6.426 -5.182,6.426 5.182,6.426 5.182,-6.426 -5.182,-6.426
  text "A" at -4.953,4.699 h1.27
  text "1" at -2.794,5.842 h1.27
Mechanical 13:
  lines w0.025: -5.055,5.799 -4.655,6.299 ; -5.055,-6.299 -5.055,6.299 5.055,6.299 5.055,-6.299 -5.055,-6.299
Mechanical 15:
  region: 5.309,-6.553 -5.309,-6.553 -5.309,6.553 5.309,6.553
  lines w0.152: -5.309,-6.553 5.309,-6.553 5.309,6.553 -5.309,6.553 -5.309,-6.553
3D body: height 0.25, standoff 0, extent 0,0 0.254,0.254
3D body "FBGA60_10X12P5_MRN.step": height 1.2, standoff 0, extent -5.055,-6.299 5.055,6.299

## IND-0603 [mm] "Chip Inductor, 2-Leads, Body 1.6x0.8mm"
height 0.95
pads (2):
  rect 0.85x0.7 smd: 1(-0.775,0) 2(0.775,0)
Top Overlay:
  lines w0.102: -1.27,-0.508 1.27,-0.508 1.27,0.508 -1.27,0.508 -1.27,-0.508
Mechanical 13:
  lines w0.1: -0.9,-0.5 0.9,-0.5 0.9,0.5 -0.9,0.5 -0.9,-0.5
Mechanical 15:
  lines w0.1: -0.5,0 0.5,0 ; 0,-0.5 0,0.5 ; -1.27,-0.508 1.27,-0.508 1.27,0.508 -1.27,0.508 -1.27,-0.508
3D body "742792623.stp": height 0.79, standoff -0.01, extent -0.8,-0.4 0.8,0.401

## IND_4028_TDK [mm]
pads (2):
  rect 1.6x3.9 smd paste+0 mask+0: 1(-1.45,0) 2(1.45,0)
Top Overlay:
  rectangle: -3.175,-1.905 -2.413,1.905
  lines w0.152: -2.159,-2.159 2.159,-2.159 ; -2.159,2.159 2.159,2.159
Mechanical 13:
  lines w0.025: -2,-1 -2,1 -1,2 1,2 2,1 2,-1 1,-2 -1,-2 -2,-1
  text "*" at -1.81,-1.27 h1.27
Mechanical 15:
  region: 2.504,-2.254 -2.504,-2.254 -2.504,2.254 2.504,2.254
  lines w0.152: -2.504,-2.254 -2.504,2.254 2.504,2.254 2.504,-2.254 -2.504,-2.254
3D body: height 0.25, standoff 0, extent 0,0 0.254,0.254
3D body "User Library-VLCF4020.STEP": height 2.06, standoff 0.06, extent -2.177,-2 1.923,2